# Altium footprint library 1.40-晶振、晶体.PcbLib: 43 footprints (part 1 of 3)
Each footprint in its own frame and in the unit in brackets; x right, y up, seen from the top. Pads: shape width x height; smd on the part's side, far side on the other; paste and mask are expansions set on the pad; w line width, h text height; cw(c..) or ccw(c..) is an arc to the next point about the centre after c.
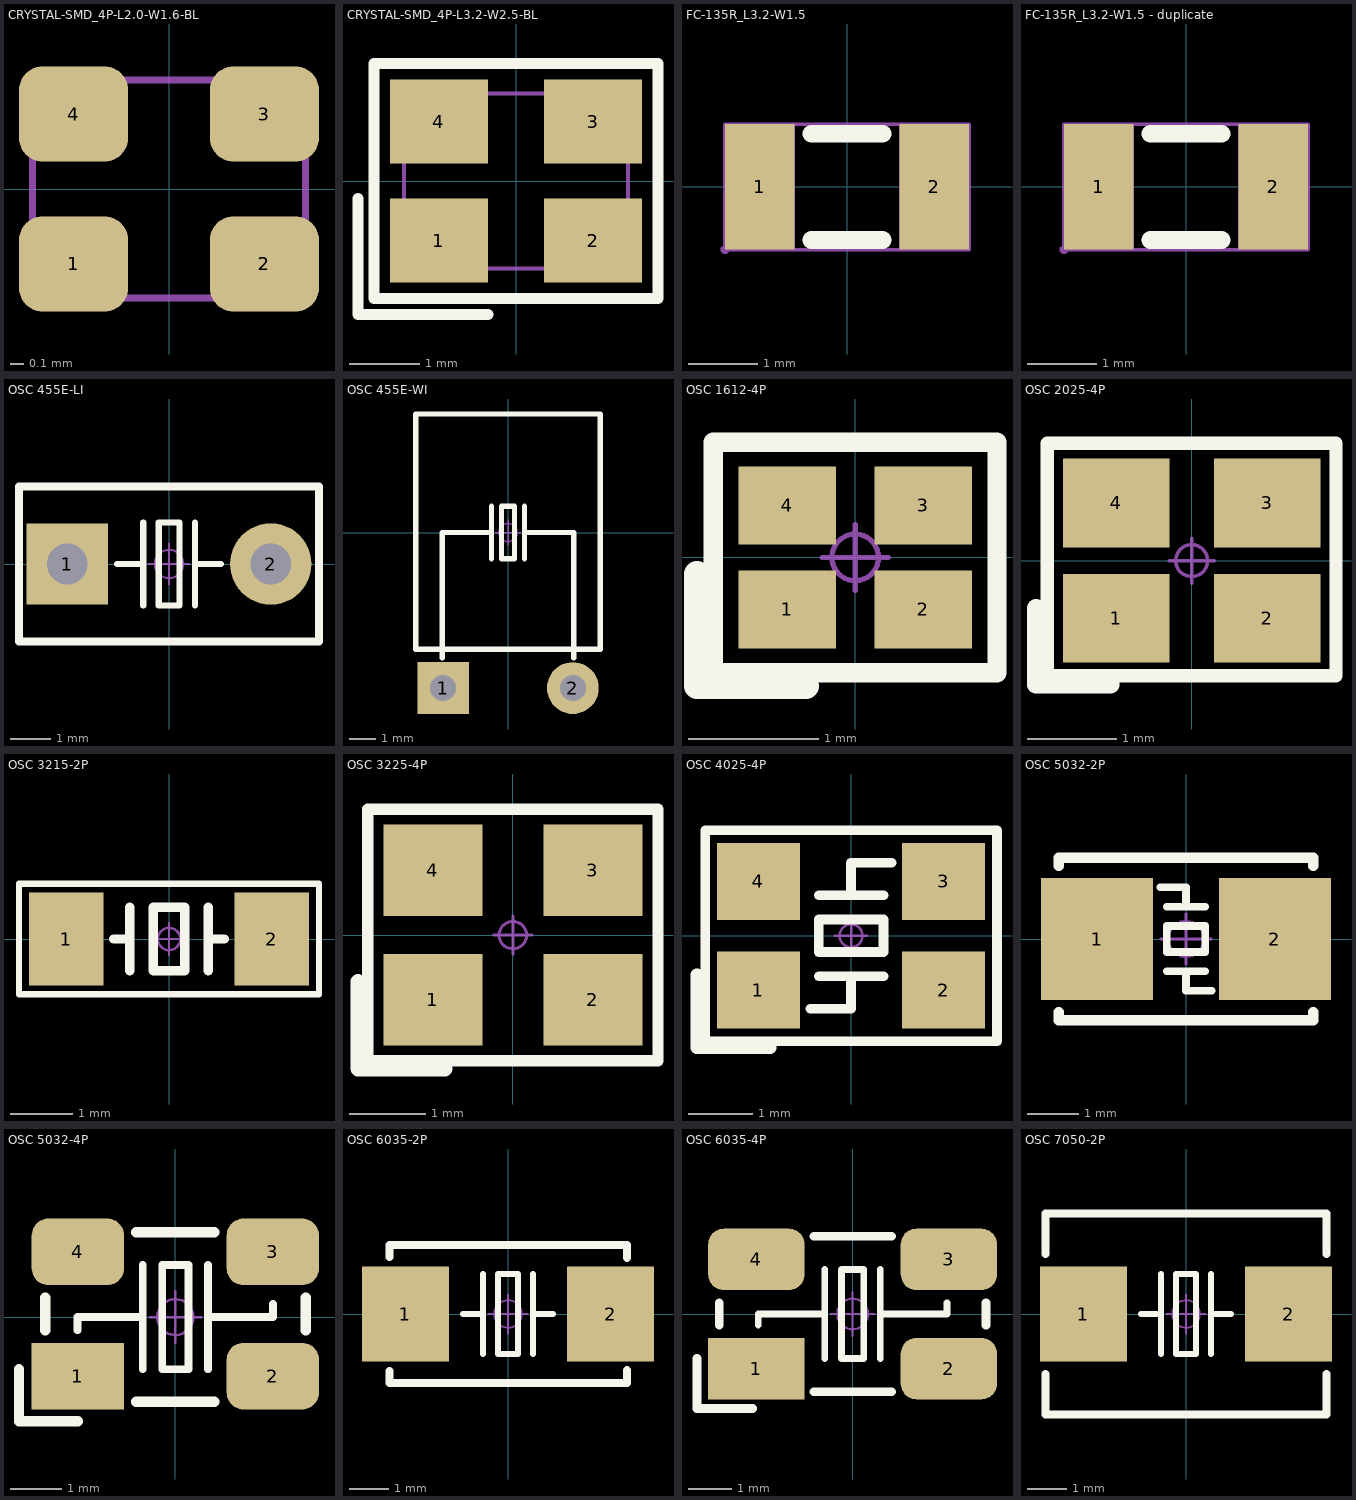
[diagram p0: the footprints below, top view; thin cyan lines are the x and y axes]

## CRYSTAL-SMD_4P-L2.0-W1.6-BL [mm]
pads (4):
  rrect50% 0.8x0.7 smd: 1(-0.7,-0.55) 2(0.7,-0.55) 3(0.7,0.55) 4(-0.7,0.55)
Mechanical 15:
  region: -1,-0.74 -1.025,-0.74 -1.06,-0.775 -1.06,-0.825 -1.025,-0.86 -1,-0.86 -0.975,-0.86 -0.94,-0.825 -0.94,-0.775 -0.975,-0.74 -1,-0.74
  region: -0.95,0.275 -0.95,0.75 -0.375,0.75 -0.375,0.275
  region: -0.95,-0.75 -0.95,-0.275 -0.375,-0.275 -0.375,-0.75
  region: 0.95,-0.275 0.95,-0.75 0.375,-0.75 0.375,-0.275
  region: 0.95,0.75 0.95,0.275 0.375,0.275 0.375,0.75
  lines w0.051: -1,-0.8 -1,0.8 1,0.8 1,-0.8 -1,-0.8
3D body "jz.STEP": height 0.46, standoff 0, extent -1.077,-0.828 0.973,0.822

## CRYSTAL-SMD_4P-L3.2-W2.5-BL [mm]
pads (4):
  rect 1.4x1.2 smd: 1(-1.1,-0.85) 2(1.1,-0.85) 3(1.1,0.85) 4(-1.1,0.85)
Top Overlay:
  lines w0.152: -2.257,-0.25 -2.257,-1.907 -0.4,-1.907 ; -2.029,-1.678 2.029,-1.678 2.029,1.679 -2.029,1.679 -2.029,-1.678
Mechanical 6:
  circle w0.254: c-1.27,-0.889 r0.127
Mechanical 15:
  region: -1.5,-0.35 -0.6,-0.35 -0.6,-1.15 -1.5,-1.15
  region: 0.6,-0.35 1.5,-0.35 1.5,-1.15 0.6,-1.15
  region: 0.6,1.15 1.5,1.15 1.5,0.35 0.6,0.35
  region: -1.5,1.15 -0.6,1.15 -0.6,0.35 -1.5,0.35
  region: -1.54,-1.25 -1.54,-1.225 -1.575,-1.19 -1.625,-1.19 -1.66,-1.225 -1.66,-1.25 -1.66,-1.275 -1.625,-1.31 -1.575,-1.31 -1.54,-1.275 -1.54,-1.25
  lines w0.051: -1.6,-1.25 1.6,-1.25 1.6,1.25 -1.6,1.25 -1.6,-1.25
3D body "NlYB-X2-CRYSTAL-SMD_4P-L3.2-W2.5-BL jz.STEP": height 0.8, standoff -0.01, extent -1.6,-1.25 1.6,1.25

## FC-135R_L3.2-W1.5 [mm]
pads (2):
  rect 1x1.8 smd: 1(-1.25,0) 2(1.25,0)
Top Overlay:
  lines w0.254: -0.508,-0.762 0.508,-0.762 ; -0.508,0.762 0.508,0.762
Mechanical 15:
  region: -1.69,-0.9 -1.69,-0.875 -1.725,-0.84 -1.775,-0.84 -1.81,-0.875 -1.81,-0.9 -1.81,-0.925 -1.775,-0.96 -1.725,-0.96 -1.69,-0.925 -1.69,-0.9
  region: -1.75,-0.9 -1.75,0.9 -0.75,0.9 -0.75,-0.9
  region: 0.75,-0.9 0.75,0.9 1.75,0.9 1.75,-0.9
  lines w0.051: -1.75,-0.9 1.75,-0.9 1.75,0.9 -1.75,0.9 -1.75,-0.9
3D body "NlYB-X2-CRYSTAL-SMD_4P-L3.2-W2.5-BL jz.STEP": height 0.8, standoff 0, extent -1.6,-0.75 1.6,0.75

## FC-135R_L3.2-W1.5 - duplicate [mm]
pads (2):
  rect 1x1.8 smd: 1(-1.25,0) 2(1.25,0)
Top Overlay:
  lines w0.254: -0.508,-0.762 0.508,-0.762 ; -0.508,0.762 0.508,0.762
Mechanical 15:
  region: -1.69,-0.9 -1.69,-0.875 -1.725,-0.84 -1.775,-0.84 -1.81,-0.875 -1.81,-0.9 -1.81,-0.925 -1.775,-0.96 -1.725,-0.96 -1.69,-0.925 -1.69,-0.9
  region: -1.75,-0.9 -1.75,0.9 -0.75,0.9 -0.75,-0.9
  region: 0.75,-0.9 0.75,0.9 1.75,0.9 1.75,-0.9
  lines w0.051: -1.75,-0.9 1.75,-0.9 1.75,0.9 -1.75,0.9 -1.75,-0.9

## OSC 455E-LI [mm] "3.6mm*7mm*9mm(长*宽*高)  脚距5mm     淘宝ID:黄晶宝石"
pads (2):
  rect 2x2 hole 1 unplated: 1(-2.5,0)
  round 2 hole 1 unplated: 2(2.5,0)
Top Overlay:
  lines w0.152: -1.27,0 -0.635,0 ; -0.635,-1.016 -0.635,1.016 ; 0.635,-1.016 0.635,1.016 ; 0.635,0 1.27,0 ; -0.254,-1.016 0.254,-1.016 0.254,1.016 -0.254,1.016 -0.254,-1.016
  lines w0.203: -3.683,-1.905 -3.683,1.905 3.683,1.905 3.683,-1.905 -3.683,-1.905
Mechanical 15:
  circle w0.05: c0,0 r0.35
  lines w0.05: -0.5,0 0.5,0 ; 0,-0.5 0,0.5
3D body "455E.STEP": height 9.05, standoff -3.45, extent -3.5,-1.75 3.5,1.75

## OSC 455E-WI [mm] "3.6mm*7mm*9mm(长*宽*高)  脚距5mm      淘宝ID:黄晶宝石"
pads (2):
  rect 2x2 hole 1 unplated: 1(-2.5,-6)
  round 2 hole 1 unplated: 2(2.5,-6)
Top Overlay:
  lines w0.203: -2.54,-4.826 -2.54,-4.5 -2.54,0 -1.27,0 -0.635,0 ; -0.635,-1.016 -0.635,1.016 ; 0.635,-1.016 0.635,1.016 ; 0.635,0 1.27,0 2.54,0 2.54,-4.5 2.54,-4.826 ; -3.556,-4.5 -3.556,4.572 3.556,4.572 3.556,-4.5 -3.556,-4.5 ; -0.254,-1.016 0.254,-1.016 0.254,1.016 -0.254,1.016 -0.254,-1.016
Mechanical 15:
  circle w0.05: c0,0 r0.35
  lines w0.05: -0.5,0 0.5,0 ; 0,-0.5 0,0.5
3D body "455E-WI.STEP": height 3.65, standoff -3.45, extent -3.5,-6.1 3.5,4.5

## OSC 1612-4P [mm] "1.6*1.2*0.35mm（长宽高）                    淘宝ID:黄晶宝石"
pads (4):
  rect 0.75x0.6 smd: 1(-0.525,-0.4) 2(0.525,-0.4) 3(0.525,0.4) 4(-0.525,0.4)
Top Overlay:
  lines w0.15: -1.092,-0.889 -1.092,0.889 1.092,0.889 1.092,-0.889 -1.092,-0.889
  lines w0.2: -1.219,-0.991 -0.381,-0.991 ; -1.219,-0.965 -1.219,-0.127
Mechanical 15:
  circle w0.04: c0,0 r0.18
  lines w0.04: -0.254,0 0.254,0 ; 0,-0.254 0,0.254
3D body "OSC 1612-4.STEP": height 0.35, standoff -0.02, extent -0.8,-0.6 0.8,0.6

## OSC 2025-4P [mm] "2*2.5*0.55mm(长宽高)                    淘宝ID:黄晶宝石"
pads (4):
  rect 1.2x1 smd: 1(-0.85,-0.65) 2(0.85,-0.65) 3(0.85,0.65) 4(-0.85,0.65)
Top Overlay:
  lines w0.15: -1.626,-1.295 -1.626,1.321 1.626,1.321 1.626,-1.295 -1.626,-1.295
  lines w0.2: -1.753,-1.397 -0.914,-1.397 ; -1.753,-1.372 -1.753,-0.533
Mechanical 15:
  circle w0.04: c0,0 r0.18
  lines w0.04: -0.254,0 0.254,0 ; 0,-0.254 0,0.254
3D body "OSC 2025-4.STEP": height 0.55, standoff -0.02, extent -1.25,-1 1.25,1

## OSC 3215-2P [mm] "3.2*1.5*0.6mm(长宽高)                      淘宝ID:黄晶宝石"
pads (2):
  rect 1.2x1.5 smd: 1(-1.65,0) 2(1.65,0)
Top Overlay:
  lines w0.1: -2.413,-0.889 2.413,-0.889 2.413,0.889 -2.413,0.889 -2.413,-0.889
  lines w0.152: -0.889,0 -0.635,0 ; -0.635,-0.508 -0.635,0.508 ; 0.635,-0.508 0.635,0.508 ; 0.635,0 0.889,0 ; -0.254,-0.508 -0.254,0.508 0.254,0.508 0.254,-0.508 -0.254,-0.508
Mechanical 15:
  circle w0.04: c0,0 r0.18
  lines w0.04: -0.254,0 0.254,0 ; 0,-0.254 0,0.254
3D body "OSC 3215-2.STEP": height 0.61, standoff -0.01, extent -1.6,-0.75 1.6,0.75

## OSC 3225-4P [mm] "3.2*2.5*0.7mm(长宽高)                         淘宝ID:黄晶宝石"
pads (4):
  rect 1.3x1.2 smd: 1(-1.05,-0.85) 2(1.05,-0.85) 3(1.05,0.85) 4(-1.05,0.85)
Top Overlay:
  lines w0.15: -1.905,-1.651 1.905,-1.651 1.905,1.651 -1.905,1.651 -1.905,-1.651
  lines w0.2: -2.032,-1.753 -0.889,-1.753 ; -2.032,-1.727 -2.032,-0.61
Mechanical 15:
  circle w0.04: c0,0 r0.18
  lines w0.04: -0.254,0 0.254,0 ; 0,-0.254 0,0.254
3D body "OSC 3225-4.STEP": height 0.7, standoff -0.02, extent -1.6,-1.25 1.6,1.25

## OSC 4025-4P [mm] "4*2.5*0.7mm(长宽高)                                   淘宝ID:黄晶宝石"
pads (4):
  rect 1.3x1.2 smd: 1(-1.45,-0.85) 2(1.45,-0.85) 3(1.45,0.85) 4(-1.45,0.85)
Top Overlay:
  lines w0.15: -2.286,-1.651 2.286,-1.651 2.286,1.651 -2.286,1.651 -2.286,-1.651
  lines w0.152: -0.635,-1.143 0,-1.143 0,-0.635 ; -0.508,-0.635 0.508,-0.635 ; -0.508,0.635 0.508,0.635 ; 0,0.635 0,1.143 0.635,1.143 ; -0.508,-0.254 0.508,-0.254 0.508,0.254 -0.508,0.254 -0.508,-0.254
  lines w0.2: -2.413,-1.753 -1.27,-1.753 ; -2.413,-1.727 -2.413,-0.61
Mechanical 15:
  circle w0.04: c0,0 r0.18
  lines w0.04: -0.254,0 0.254,0 ; 0,-0.254 0,0.254
3D body "OSC 4025-4.STEP": height 0.7, standoff -0.02, extent -2,-1.25 2,1.25

## OSC 5032-2P [mm] "5mm*3.2mm*0.8mm(长*宽*高)                  淘宝ID:黄晶宝石"
pads (2):
  rect 2.2x2.4 smd: 1(-1.75,0) 2(1.75,0)
Top Overlay:
  lines w0.152: -0.508,1.016 0,1.016 0,0.635 ; -0.381,-0.635 0.381,-0.635 ; -0.381,0.635 0.381,0.635 ; 0,-0.635 0,-1.016 0.381,-1.016 0.508,-1.016 ; -0.381,-0.254 -0.381,0.254 0.381,0.254 0.381,-0.254 -0.381,-0.254
  lines w0.203: -2.5,-1.437 -2.5,-1.6 2.5,-1.6 2.5,-1.437 ; -2.5,1.437 -2.5,1.6 2.5,1.6 2.5,1.437
Mechanical 15:
  circle w0.05: c0,0 r0.35
  lines w0.05: -0.5,0 0.5,0 ; 0,-0.5 0,0.5
3D body "OSC 5032-2.STEP": height 0.86, standoff 0.04, extent -2.5,-1.6 2.5,1.6

## OSC 5032-4P [mm] "5mm*3.2mm*0.8mm(长*宽*高)     淘宝ID:黄晶宝石"
pads (4):
  rect 1.8x1.3 smd: 1(-1.9,-1.15)
  rrect50% 1.8x1.3 smd: 2(1.9,-1.15) 3(1.9,1.272) 4(-1.9,1.272)
Top Overlay:
  lines w0.152: -1.905,-0.254 -1.905,0 -1.397,0 -0.635,0 ; -0.635,-1.016 -0.635,1.016 ; 0.635,-1.016 0.635,1.016 ; 0.635,0 1.397,0 1.905,0 1.905,0.254 ; -0.254,-1.016 0.254,-1.016 0.254,1.016 -0.254,1.016 -0.254,-1.016
  lines w0.203: -3.048,-1.016 -3.048,-2.032 -1.905,-2.032 ; -2.54,-0.254 -2.54,0.381 ; -0.762,-1.651 0.762,-1.651 ; -0.762,1.651 0.762,1.651 ; 2.54,-0.254 2.54,0.381
Mechanical 15:
  circle w0.05: c0,0 r0.35
  lines w0.05: -0.5,0 0.5,0 ; 0,-0.5 0,0.5
3D body "OSC 5032-4.STEP": height 0.86, standoff 0.03, extent -2.5,-1.6 2.5,1.6

## OSC 6035-2P [mm] "6mm*3.5mm*1mm(长*宽*高)"
pads (2):
  rect 2.2x2.4 smd: 1(-2.6,0) 2(2.6,0)
Top Overlay:
  lines w0.152: -1.143,0 -0.635,0 ; -0.635,-1.016 -0.635,1.016 ; 0.635,-1.016 0.635,1.016 ; 0.635,0 1.143,0 ; -0.254,-1.016 -0.254,1.016 0.254,1.016 0.254,-1.016 -0.254,-1.016
  lines w0.203: -3,-1.445 -3,-1.75 3.02,-1.75 3.02,-1.425 ; -3,1.445 -3,1.75 3.02,1.75 3.02,1.425
Mechanical 15:
  circle w0.05: c0,0 r0.35
  lines w0.05: -0.5,0 0.5,0 ; 0,-0.5 0,0.5
3D body "OSC 6035-2.STEP": height 1.06, standoff 0.04, extent -3,-1.75 3,1.75

## OSC 6035-4P [mm] "6mm*3.5mm*1mm(长*宽*高)                淘宝ID:黄晶宝石"
pads (4):
  rect 2.2x1.4 smd: 1(-2.2,-1.25)
  rrect50% 2.2x1.4 smd: 2(2.2,-1.25) 3(2.2,1.25) 4(-2.2,1.25)
Top Overlay:
  lines w0.152: -2.159,-0.254 -2.159,0 -1.397,0 -0.635,0 ; -0.635,-1.016 -0.635,1.016 ; 0.635,-1.016 0.635,1.016 ; 0.635,0 1.397,0 2.159,0 2.159,0.254 ; -0.254,-1.016 0.254,-1.016 0.254,1.016 -0.254,1.016 -0.254,-1.016
  lines w0.203: -3.556,-1.016 -3.556,-2.159 -2.286,-2.159 ; -3.048,-0.254 -3.048,0.254 ; -0.889,-1.778 0.889,-1.778 ; -0.889,1.778 0.889,1.778 ; 3.048,-0.254 3.048,0.254
Mechanical 15:
  circle w0.05: c0,0 r0.35
  lines w0.05: -0.5,0 0.5,0 ; 0,-0.5 0,0.5
3D body "OSC 6035-4.STEP": height 1.06, standoff 0.03, extent -3,-1.75 3,1.75

## OSC 7050-2P [mm] "7mm*5mm*1.3mm(长*宽*高)"
pads (2):
  rect 2.2x2.4 smd: 1(-2.6,0) 2(2.6,0)
Top Overlay:
  lines w0.152: -1.143,0 -0.635,0 ; -0.635,-1.016 -0.635,1.016 ; 0.635,-1.016 0.635,1.016 ; 0.635,0 1.143,0 ; -0.254,-1.016 0.254,-1.016 0.254,1.016 -0.254,1.016 -0.254,-1.016
  lines w0.203: -3.556,-1.524 -3.556,-2.54 3.556,-2.54 3.556,-1.524 ; -3.556,1.524 -3.556,2.54 3.556,2.54 3.556,1.524
Mechanical 15:
  circle w0.05: c0,0 r0.35
  lines w0.05: -0.5,0 0.5,0 ; 0,-0.5 0,0.5
3D body "OSC 7050-2.STEP": height 1.36, standoff 0.03, extent -3.5,-2.5 3.5,2.5